# Altium schematic symbol library BQ25601RTWR.SchLib: 1 symbol
Pins are listed as number, name and electrical type; pins without a type are passive.

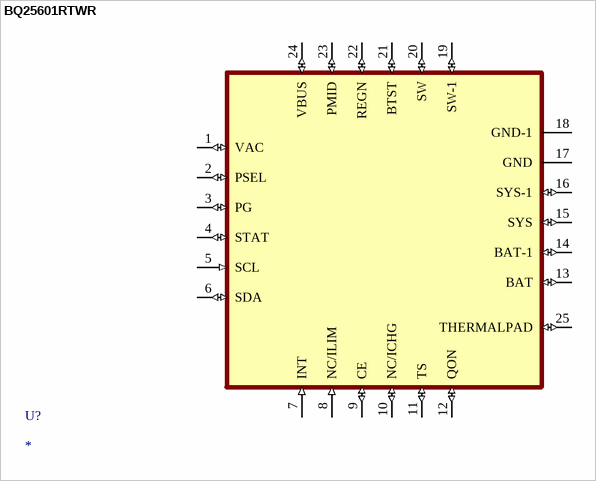
[diagram p0: symbol BQ25601RTWR]

## BQ25601RTWR
designator U?
MP: BQ25601RTWR; Package: None; Price: None; Value: *; Availability: Unavailable
footprint QFN50P400X400X80-25N
pins: 1 VAC (io), 2 PSEL (io), 3 PG (io), 4 STAT (io), 5 SCL (in), 6 SDA (io), 7 INT (in), 8 NC/ILIM (in), 9 CE (io), 10 NC/ICHG (io), 11 TS (io), 12 QON (io), 13 BAT (io), 14 BAT-1 (io), 15 SYS (io), 16 SYS-1 (io), 17 GND (power), 18 GND-1 (power), 19 SW-1 (io), 20 SW (io), 21 BTST (io), 22 REGN (io), 23 PMID (io), 24 VBUS (io), 25 THERMALPAD (io)